# Altium schematic symbol library TitansLib.SchLib: 462 symbols (part 4 of 24)
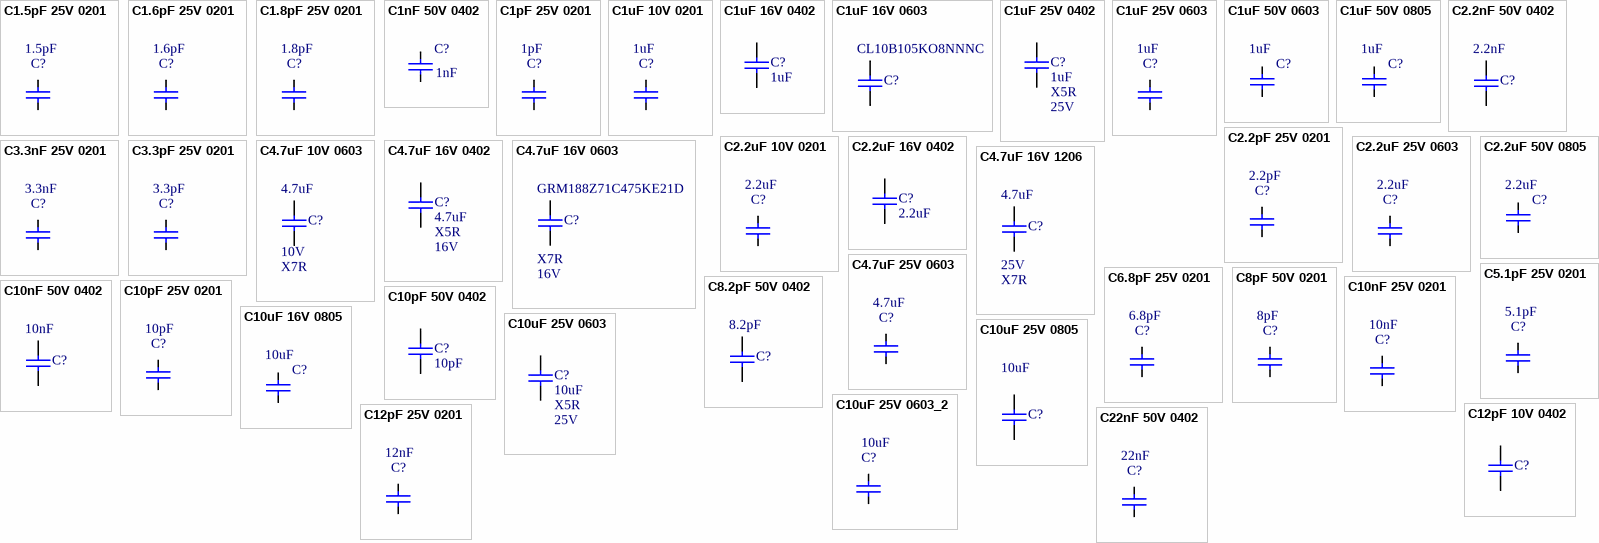
[diagram p20: symbols C1.5pF 25V 0201 to C22nF 50V 0402]

## C1.5pF 25V 0201
designator C?, comment value 1.5pF  (hidden comment: GJM0335C1E1R5BB01D)
25V 1.5pF C0G 0201 Multilayer Ceramic Capacitors MLCC - SMD/SMT ROHS; Manufacturer: Murata; Manufacturer Lifecycle Status: IN PRODUCTION; Temperature Coefficient: 30ppm/°C; Supplier: DigiKey; Supplier Part Number: 490-11175-1-ND; Manufacturer Part Number: GJM0335C1E1R5BB01D; RoHS: Compliant; Category: Ceramic Capacitors; Stock: 1362018; Pricing: 1=0.1, 10=0.052, 50=0.0356, 100=0.0307, 500=0.02244, 1000=0.01991, 2500=0.0143, 5000=0.01305 (USD); Case/Package: 0201; Case Code (Imperial): 0201; Case Code (Metric): 0603; Depth: 300µm; Dielectric: C0G; Dielectric Material: Ceramic; Export Control Classification Number (ECCN) Code: EAR99; Height: 300µm; Harmonized Tariff Schedule (HTS) Code: 8532.24.00.20; Introduction Date: 2008-02-22; Lead Free: Lead Free; Length: 600µm; Lifecycle Status: Production; Material: Ceramic; Max Operating Temperature: 125°C; Min Operating Temperature: -55°C; Mounting Technology: Surface Mount; Number of Terminals: 2; Packaging: Tape & Reel; Radiation Hardening: No; REACH SVHC: Yes; Schedule B: 8532240020, 8532240020|8532240020|8532240020|8532240020|8532240020; Termination: SMD/SMT; Thickness: 300µm; Voltage Rating: 25V; Voltage Rating (DC): 25V; Width: 300µm; ComponentLink1URL: https://datasheet.octopart.com:443/GJM0335C1E1R5BB01D-Murata-datasheet-14405739.pdf?src-supplier=Future+Electronics; ComponentLink1Description: https://datasheet.octopart.com:443/GJM0335C1E1R5BB01D-Murata-datasheet-14405739.pdf?src-supplier=Future+Electronics; ComponentLink2URL: https://datasheet.octopart.com:443/GJM0335C1E1R5BB01D-Murata-datasheet-22122223.pdf?src-supplier=Future+Electronics; ComponentLink2Description: https://datasheet.octopart.com:443/GJM0335C1E1R5BB01D-Murata-datasheet-22122223.pdf?src-supplier=Future+Electronics; ComponentLink3URL: https://datasheet.octopart.com:443/GJM0335C1E1R5BB01D-Murata-datasheet-44104868.pdf?src-supplier=Future+Electronics; ComponentLink3Description: https://datasheet.octopart.com:443/GJM0335C1E1R5BB01D-Murata-datasheet-44104868.pdf?src-supplier=Future+Electronics; ComponentLink4URL: https://datasheet.octopart.com:443/GJM0335C1E1R5BB01D-Murata-datasheet-165579666.pdf?src-supplier=TME; ComponentLink4Description: https://datasheet.octopart.com:443/GJM0335C1E1R5BB01D-Murata-datasheet-165579666.pdf?src-supplier=TME; ComponentLink5URL: https://datasheet.octopart.com:443/GJM0335C1E1R5BB01D-Murata-datasheet-12511495.pdf?src-supplier=TME; ComponentLink5Description: https://datasheet.octopart.com:443/GJM0335C1E1R5BB01D-Murata-datasheet-12511495.pdf?src-supplier=TME; ComponentLink6URL: https://datasheet.octopart.com:443/GJM0335C1E1R5BB01D-Murata-datasheet-141270577.pdf?src-supplier=Ciiva; ComponentLink6Description: https://datasheet.octopart.com:443/GJM0335C1E1R5BB01D-Murata-datasheet-141270577.pdf?src-supplier=Ciiva; ComponentLink7URL: https://datasheet.octopart.com:443/GJM0335C1E1R5BB01D-Murata-datasheet-140663708.pdf?src-supplier=Ciiva; ComponentLink7Description: https://datasheet.octopart.com:443/GJM0335C1E1R5BB01D-Murata-datasheet-140663708.pdf?src-supplier=Ciiva; ComponentLink8URL: https://datasheet.octopart.com:443/GJM0335C1E1R5BB01D-Murata-datasheet-138722006.pdf?src-supplier=Ciiva; ComponentLink8Description: https://datasheet.octopart.com:443/GJM0335C1E1R5BB01D-Murata-datasheet-138722006.pdf?src-supplier=Ciiva; ComponentLink9URL: https://datasheet.octopart.com/GJM0335C1E1R5BB01D-Murata-datasheet-12515295.pdf; ComponentLink9Description: https://datasheet.octopart.com/GJM0335C1E1R5BB01D-Murata-datasheet-12515295.pdf; ComponentLink10URL: https://datasheet.octopart.com/GJM0335C1E1R5BB01D-Murata-datasheet-12510076.pdf; ComponentLink10Description: https://datasheet.octopart.com/GJM0335C1E1R5BB01D-Murata-datasheet-12510076.pdf; ComponentLink11URL: https://datasheet.octopart.com/GJM0335C1E1R5BB01D-Murata-datasheet-11978611.pdf; ComponentLink11Description: https://datasheet.octopart.com/GJM0335C1E1R5BB01D-Murata-datasheet-11978611.pdf; ComponentLink12URL: https://datasheet.octopart.com/GJM0335C1E1R5BB01D-Murata-datasheet-10025737.pdf; ComponentLink12Description: https://datasheet.octopart.com/GJM0335C1E1R5BB01D-Murata-datasheet-10025737.pdf; ComponentLink13URL: https://datasheet.octopart.com/GJM0335C1E1R5BB01D-Murata-datasheet-8819587.pdf; ComponentLink13Description: https://datasheet.octopart.com/GJM0335C1E1R5BB01D-Murata-datasheet-8819587.pdf; ComponentLink14URL: http://sigma.octopart.com:80/reach_statement/Murata-company-16.pdf?src-supplier=Compliance+Statements; ComponentLink14Description: http://sigma.octopart.com:80/reach_statement/Murata-company-16.pdf?src-supplier=Compliance+Statements
footprint CAPC0603X03N (Chip Capacitor, 2-Leads, Body 0.60x0.30mm, IPC Medium Density)
pins: 1, 2

## C1.6pF 25V 0201
designator C?, comment value 1.6pF  (hidden comment: GJM0335C1E1R3BB01D)
25V 1.6pF C0G 0201 Multilayer Ceramic Capacitors MLCC - SMD/SMT ROHS; Manufacturer: Murata; Manufacturer Part Number: GJM0335C1E1R6BB01D; Manufacturer Lifecycle Status: IN PRODUCTION; Temperature Coefficient: 30ppm/°C; Supplier: DigiKey; Supplier Part Number: 490-11177-1-ND; RoHS: Compliant; Category: Ceramic Capacitors; Stock: 99257; Pricing: 1=0.1, 10=0.037, 50=0.025, 100=0.0214, 500=0.01538, 1000=0.01353, 2500=0.01159, 5000=0.01042 (USD); Case/Package: 0201; Case Code (Imperial): 0201; Case Code (Metric): 0603; Depth: 300µm; Dielectric: C0G; Dielectric Material: Ceramic; Height: 300µm; Lead Free: Lead Free; Length: 600µm; Lifecycle Status: Production; Material: Ceramic; Max Operating Temperature: 125°C; Min Operating Temperature: -55°C; Mounting Technology: Surface Mount; Number of Terminals: 2; Packaging: Tape & Reel; Radiation Hardening: No; REACH SVHC: Yes; Schedule B: 8532240020, 8532240020|8532240020|8532240020|8532240020|8532240020; Termination: SMD/SMT; Thickness: 300µm; Voltage Rating: 25V; Voltage Rating (DC): 25V; Width: 300µm; ComponentLink1URL: https://datasheet.octopart.com:443/GJM0335C1E1R6BB01D-Murata-datasheet-165579666.pdf?src-supplier=TME; ComponentLink1Description: https://datasheet.octopart.com:443/GJM0335C1E1R6BB01D-Murata-datasheet-165579666.pdf?src-supplier=TME; ComponentLink2URL: https://datasheet.octopart.com:443/GJM0335C1E1R6BB01D-Murata-datasheet-12511495.pdf?src-supplier=TME; ComponentLink2Description: https://datasheet.octopart.com:443/GJM0335C1E1R6BB01D-Murata-datasheet-12511495.pdf?src-supplier=TME; ComponentLink3URL: https://datasheet.octopart.com:443/GJM0335C1E1R6BB01D-Murata-datasheet-141270577.pdf?src-supplier=Ciiva; ComponentLink3Description: https://datasheet.octopart.com:443/GJM0335C1E1R6BB01D-Murata-datasheet-141270577.pdf?src-supplier=Ciiva; ComponentLink4URL: https://datasheet.octopart.com:443/GJM0335C1E1R6BB01D-Murata-datasheet-140663711.pdf?src-supplier=Ciiva; ComponentLink4Description: https://datasheet.octopart.com:443/GJM0335C1E1R6BB01D-Murata-datasheet-140663711.pdf?src-supplier=Ciiva; ComponentLink5URL: https://datasheet.octopart.com:443/GJM0335C1E1R6BB01D-Murata-datasheet-138722009.pdf?src-supplier=Ciiva; ComponentLink5Description: https://datasheet.octopart.com:443/GJM0335C1E1R6BB01D-Murata-datasheet-138722009.pdf?src-supplier=Ciiva; ComponentLink6URL: https://datasheet.octopart.com:443/GJM0335C1E1R6BB01D-Murata-datasheet-22122223.pdf?src-supplier=Future+Electronics; ComponentLink6Description: https://datasheet.octopart.com:443/GJM0335C1E1R6BB01D-Murata-datasheet-22122223.pdf?src-supplier=Future+Electronics; ComponentLink7URL: https://datasheet.octopart.com/GJM0335C1E1R6BB01D-Murata-datasheet-12515295.pdf; ComponentLink7Description: https://datasheet.octopart.com/GJM0335C1E1R6BB01D-Murata-datasheet-12515295.pdf; ComponentLink8URL: https://datasheet.octopart.com/GJM0335C1E1R6BB01D-Murata-datasheet-12510076.pdf; ComponentLink8Description: https://datasheet.octopart.com/GJM0335C1E1R6BB01D-Murata-datasheet-12510076.pdf; ComponentLink9URL: https://datasheet.octopart.com/GJM0335C1E1R6BB01D-Murata-datasheet-11978611.pdf; ComponentLink9Description: https://datasheet.octopart.com/GJM0335C1E1R6BB01D-Murata-datasheet-11978611.pdf; ComponentLink10URL: https://datasheet.octopart.com/GJM0335C1E1R6BB01D-Murata-datasheet-10025737.pdf; ComponentLink10Description: https://datasheet.octopart.com/GJM0335C1E1R6BB01D-Murata-datasheet-10025737.pdf; ComponentLink11URL: https://datasheet.octopart.com/GJM0335C1E1R6BB01D-Murata-datasheet-8819587.pdf; ComponentLink11Description: https://datasheet.octopart.com/GJM0335C1E1R6BB01D-Murata-datasheet-8819587.pdf; ComponentLink12URL: https://datasheet.octopart.com/GJM0335C1E1R6BB01D-Murata-datasheet-14405748.pdf; ComponentLink12Description: https://datasheet.octopart.com/GJM0335C1E1R6BB01D-Murata-datasheet-14405748.pdf; ComponentLink13URL: http://sigma.octopart.com:80/reach_statement/Murata-company-16.pdf?src-supplier=Compliance+Statements; ComponentLink13Description: http://sigma.octopart.com:80/reach_statement/Murata-company-16.pdf?src-supplier=Compliance+Statements
footprint CAPC0603X03N (Chip Capacitor, 2-Leads, Body 0.60x0.30mm, IPC Medium Density)
pins: 1, 2

## C1.8pF 25V 0201
designator C?, comment value 1.8pF  (hidden comment: GJM0335C1E1R8BB01D)
25V 1.8pF C0G 0201 Multilayer Ceramic Capacitors MLCC - SMD/SMT ROHS; Manufacturer: Murata; Manufacturer Lifecycle Status: IN PRODUCTION; Temperature Coefficient: 30ppm/°C; Supplier: DigiKey; Supplier Part Number: 490-8581-1-ND; Manufacturer Part Number: GJM0335C1E1R8BB01D; RoHS: Compliant; Category: Ceramic Capacitors; Stock: 504881; Pricing: 1=0.1, 10=0.052, 50=0.0356, 100=0.0307, 500=0.02244, 1000=0.01991, 2500=0.0143 (USD); Case/Package: 0201; Case Code (Imperial): 0201; Case Code (Metric): 0603; Depth: 300µm; Dielectric: C0G; Dielectric Material: Ceramic; Export Control Classification Number (ECCN) Code: EAR99; Height: 300µm; Harmonized Tariff Schedule (HTS) Code: 8532.24.00.20; Introduction Date: 2008-02-22; Lead Free: Lead Free; Length: 600µm; Lifecycle Status: Production; Material: Ceramic; Max Operating Temperature: 125°C; Min Operating Temperature: -55°C; Mounting Technology: Surface Mount; Number of Terminals: 2; Packaging: Bulk; Radiation Hardening: No; REACH SVHC: Yes; Schedule B: 8532240020, 8532240020|8532240020, 8532240020|8532240020|8532240020, 8532240020|8532240020|8532240020|8532240020; Termination: SMD/SMT; Thickness: 300µm; Voltage Rating: 25V; Voltage Rating (DC): 25V; Width: 300µm; ComponentLink1URL: https://datasheet.octopart.com:443/GJM0335C1E1R8BB01D-Murata-datasheet-165579666.pdf?src-supplier=TME; ComponentLink1Description: https://datasheet.octopart.com:443/GJM0335C1E1R8BB01D-Murata-datasheet-165579666.pdf?src-supplier=TME; ComponentLink2URL: https://datasheet.octopart.com:443/GJM0335C1E1R8BB01D-Murata-datasheet-12511495.pdf?src-supplier=TME; ComponentLink2Description: https://datasheet.octopart.com:443/GJM0335C1E1R8BB01D-Murata-datasheet-12511495.pdf?src-supplier=TME; ComponentLink3URL: https://datasheet.octopart.com:443/GJM0335C1E1R8BB01D-Murata-datasheet-141270577.pdf?src-supplier=Ciiva; ComponentLink3Description: https://datasheet.octopart.com:443/GJM0335C1E1R8BB01D-Murata-datasheet-141270577.pdf?src-supplier=Ciiva; ComponentLink4URL: https://datasheet.octopart.com:443/GJM0335C1E1R8BB01D-Murata-datasheet-140663717.pdf?src-supplier=Ciiva; ComponentLink4Description: https://datasheet.octopart.com:443/GJM0335C1E1R8BB01D-Murata-datasheet-140663717.pdf?src-supplier=Ciiva; ComponentLink5URL: https://datasheet.octopart.com:443/GJM0335C1E1R8BB01D-Murata-datasheet-138722015.pdf?src-supplier=Ciiva; ComponentLink5Description: https://datasheet.octopart.com:443/GJM0335C1E1R8BB01D-Murata-datasheet-138722015.pdf?src-supplier=Ciiva; ComponentLink6URL: https://datasheet.octopart.com:443/GJM0335C1E1R8BB01D-Murata-datasheet-192320398.pdf?src-supplier=HQonline; ComponentLink6Description: https://datasheet.octopart.com:443/GJM0335C1E1R8BB01D-Murata-datasheet-192320398.pdf?src-supplier=HQonline; ComponentLink7URL: https://datasheet.octopart.com/GJM0335C1E1R8BB01D-Murata-datasheet-12515295.pdf; ComponentLink7Description: https://datasheet.octopart.com/GJM0335C1E1R8BB01D-Murata-datasheet-12515295.pdf; ComponentLink8URL: https://datasheet.octopart.com/GJM0335C1E1R8BB01D-Murata-datasheet-12510076.pdf; ComponentLink8Description: https://datasheet.octopart.com/GJM0335C1E1R8BB01D-Murata-datasheet-12510076.pdf; ComponentLink9URL: https://datasheet.octopart.com/GJM0335C1E1R8BB01D-Murata-datasheet-11978611.pdf; ComponentLink9Description: https://datasheet.octopart.com/GJM0335C1E1R8BB01D-Murata-datasheet-11978611.pdf; ComponentLink10URL: https://datasheet.octopart.com/GJM0335C1E1R8BB01D-Murata-datasheet-10025737.pdf; ComponentLink10Description: https://datasheet.octopart.com/GJM0335C1E1R8BB01D-Murata-datasheet-10025737.pdf; ComponentLink11URL: https://datasheet.octopart.com/GJM0335C1E1R8BB01D-Murata-datasheet-8819587.pdf; ComponentLink11Description: https://datasheet.octopart.com/GJM0335C1E1R8BB01D-Murata-datasheet-8819587.pdf; ComponentLink12URL: https://datasheet.octopart.com/GJM0335C1E1R8BB01D-Murata-datasheet-14405746.pdf; ComponentLink12Description: https://datasheet.octopart.com/GJM0335C1E1R8BB01D-Murata-datasheet-14405746.pdf; ComponentLink13URL: https://datasheet.octopart.com:443/GJM0335C1E1R8BB01D-Murata-datasheet-118811.pdf?src-supplier=DigiKey; ComponentLink13Description: https://datasheet.octopart.com:443/GJM0335C1E1R8BB01D-Murata-datasheet-118811.pdf?src-supplier=DigiKey; ComponentLink14URL: https://datasheet.octopart.com:443/GJM0335C1E1R8BB01D-Murata-datasheet-62043883.pdf?src-supplier=Future+Electronics; ComponentLink14Description: https://datasheet.octopart.com:443/GJM0335C1E1R8BB01D-Murata-datasheet-62043883.pdf?src-supplier=Future+Electronics; ComponentLink15URL: http://sigma.octopart.com:80/reach_statement/Murata-company-16.pdf?src-supplier=Compliance+Statements; ComponentLink15Description: http://sigma.octopart.com:80/reach_statement/Murata-company-16.pdf?src-supplier=Compliance+Statements
footprint CAPC0603X03N (Chip Capacitor, 2-Leads, Body 0.60x0.30mm, IPC Medium Density)
pins: 1, 2

## C1nF 50V 0402
designator C?, comment value 1nF  (hidden comment: 04025C102KAZ2A)
Multilayer Ceramic Capacitors MLCC - SMD/SMT 1nF+/-10% 50V X7R 0402; Manufacturer: Samsung Electro-Mechanics; Supplier: Mouser; Supplier Part Number: 581-04025C102KAZ2A; Manufacturer Part Number: 04025C102KAZ2A; RoHS: Compliant; Category: Ceramic Capacitors; Stock: 26548; Supplier Unit Price 1: 0.12; Case/Package: 0402; Dielectric: X7R
footprint CAPC0402-M (Chip Capacitor, 2-Leads, Body 1.00x0.50mm, IPC Medium Density)
pins: 1, 2

## C1pF 25V 0201
designator C?, comment value 1pF  (hidden comment: GJM0335C1E1R0WB01D)
0201 1 pF 25 V ±0.05 pF Tolerance C0G SMT Multilayer Ceramic Capacitor; Manufacturer: Murata; Manufacturer Lifecycle Status: IN PRODUCTION; Temperature Coefficient: 30ppm/°C; Voltage Rating: 25V; Supplier: DigiKey; Supplier Part Number: 490-10677-1-ND; Manufacturer Part Number: GJM0335C1E1R0WB01D; RoHS: Compliant; Category: Ceramic Capacitors; Stock: 218006; Pricing: 1=0.1, 10=0.053, 50=0.0364, 100=0.0314, 500=0.02294, 1000=0.02037, 2500=0.01766, 5000=0.01602 (USD); Case/Package: 0201; Case Code (Imperial): 0201; Case Code (Metric): 0603; Depth: 300µm; Dielectric: C0G; Dielectric Material: Ceramic; Export Control Classification Number (ECCN) Code: EAR99; Height: 300µm; Harmonized Tariff Schedule (HTS) Code: 8532.24.00.20; Introduction Date: 2008-02-22; Lead Free: Lead Free; Length: 600µm; Lifecycle Status: Production; Material: Ceramic; Max Operating Temperature: 125°C; Min Operating Temperature: -55°C; Mounting Technology: Surface Mount; Number of Terminals: 2; Packaging: Tape & Reel; Radiation Hardening: No; REACH SVHC: Yes; Schedule B: 8532240020, 8532240020|8532240020, 8532240020|8532240020|8532240020, 8532240020|8532240020|8532240020|8532240020; Termination: SMD/SMT; Thickness: 300µm; Voltage Rating (DC): 25V; Width: 300µm; ComponentLink1URL: https://datasheet.octopart.com:443/GJM0335C1E1R0WB01D-Murata-datasheet-165579666.pdf?src-supplier=TME; ComponentLink1Description: https://datasheet.octopart.com:443/GJM0335C1E1R0WB01D-Murata-datasheet-165579666.pdf?src-supplier=TME; ComponentLink2URL: https://datasheet.octopart.com:443/GJM0335C1E1R0WB01D-Murata-datasheet-12511495.pdf?src-supplier=TME; ComponentLink2Description: https://datasheet.octopart.com:443/GJM0335C1E1R0WB01D-Murata-datasheet-12511495.pdf?src-supplier=TME; ComponentLink3URL: https://datasheet.octopart.com:443/GJM0335C1E1R0WB01D-Murata-datasheet-141270577.pdf?src-supplier=Ciiva; ComponentLink3Description: https://datasheet.octopart.com:443/GJM0335C1E1R0WB01D-Murata-datasheet-141270577.pdf?src-supplier=Ciiva; ComponentLink4URL: https://datasheet.octopart.com:443/GJM0335C1E1R0WB01D-Murata-datasheet-140663695.pdf?src-supplier=Ciiva; ComponentLink4Description: https://datasheet.octopart.com:443/GJM0335C1E1R0WB01D-Murata-datasheet-140663695.pdf?src-supplier=Ciiva; ComponentLink5URL: https://datasheet.octopart.com:443/GJM0335C1E1R0WB01D-Murata-datasheet-138721991.pdf?src-supplier=Ciiva; ComponentLink5Description: https://datasheet.octopart.com:443/GJM0335C1E1R0WB01D-Murata-datasheet-138721991.pdf?src-supplier=Ciiva; ComponentLink6URL: https://datasheet.octopart.com:443/GJM0335C1E1R0WB01D-Murata-datasheet-32479577.pdf?src-supplier=Future+Electronics; ComponentLink6Description: https://datasheet.octopart.com:443/GJM0335C1E1R0WB01D-Murata-datasheet-32479577.pdf?src-supplier=Future+Electronics; ComponentLink7URL: https://datasheet.octopart.com:443/GJM0335C1E1R0WB01D-Murata-datasheet-22122223.pdf?src-supplier=Future+Electronics; ComponentLink7Description: https://datasheet.octopart.com:443/GJM0335C1E1R0WB01D-Murata-datasheet-22122223.pdf?src-supplier=Future+Electronics; ComponentLink8URL: https://datasheet.octopart.com/GJM0335C1E1R0WB01D-Murata-datasheet-12515295.pdf; ComponentLink8Description: https://datasheet.octopart.com/GJM0335C1E1R0WB01D-Murata-datasheet-12515295.pdf; ComponentLink9URL: https://datasheet.octopart.com/GJM0335C1E1R0WB01D-Murata-datasheet-12510076.pdf; ComponentLink9Description: https://datasheet.octopart.com/GJM0335C1E1R0WB01D-Murata-datasheet-12510076.pdf; ComponentLink10URL: https://datasheet.octopart.com/GJM0335C1E1R0WB01D-Murata-datasheet-11978611.pdf; ComponentLink10Description: https://datasheet.octopart.com/GJM0335C1E1R0WB01D-Murata-datasheet-11978611.pdf; ComponentLink11URL: https://datasheet.octopart.com/GJM0335C1E1R0WB01D-Murata-datasheet-10025737.pdf; ComponentLink11Description: https://datasheet.octopart.com/GJM0335C1E1R0WB01D-Murata-datasheet-10025737.pdf; ComponentLink12URL: https://datasheet.octopart.com/GJM0335C1E1R0WB01D-Murata-datasheet-8819587.pdf; ComponentLink12Description: https://datasheet.octopart.com/GJM0335C1E1R0WB01D-Murata-datasheet-8819587.pdf; ComponentLink13URL: https://datasheet.octopart.com/GJM0335C1E1R0WB01D-Murata-datasheet-14405727.pdf; ComponentLink13Description: https://datasheet.octopart.com/GJM0335C1E1R0WB01D-Murata-datasheet-14405727.pdf; ComponentLink14URL: http://sigma.octopart.com:80/reach_statement/Murata-company-16.pdf?src-supplier=Compliance+Statements; ComponentLink14Description: http://sigma.octopart.com:80/reach_statement/Murata-company-16.pdf?src-supplier=Compliance+Statements
footprint CAPC0603X03N (Chip Capacitor, 2-Leads, Body 0.60x0.30mm, IPC Medium Density)
pins: 1, 2

## C1uF 10V 0201
designator C?, comment value 1uF  (hidden comment: GRM033R61A105ME44D)
10V 1uF X5R ±20% 0201 Multilayer Ceramic Capacitors MLCC - SMD/SMT ROHS; Manufacturer: Murata; Manufacturer Lifecycle Status: IN PRODUCTION; Supplier: DigiKey; Supplier Part Number: 490-GRM033R61A105ME44DCT-ND; Manufacturer Part Number: GRM033R61A105ME44D; RoHS: Compliant; Category: Ceramic Capacitors; Stock: 98810; Pricing: 1=0.1, 10=0.024, 50=0.0158, 100=0.0135, 500=0.00966, 1000=0.0084, 2500=0.00695, 5000=0.00637 (USD); Case/Package: 0201; Country of Origin: Philippines; Dielectric: X5R; Dielectric Material: Ceramic; Export Control Classification Number (ECCN) Code: EAR99; Height: 300µm; Harmonized Tariff Schedule (HTS) Code: 8532.24.00.20; Introduction Date: 2018-10-26; Length: 600µm; Lifecycle Status: Production; Material: Ceramic; Max Operating Temperature: 85°C; Min Operating Temperature: -55°C; Mounting Technology: Surface Mount; Number of Terminals: 2; REACH SVHC: Yes; Thickness: 300µm; Tolerance: 20%; Voltage Rating: 10V; Voltage Rating (DC): 10V; Width: 300µm; ComponentLink1URL: https://datasheet.octopart.com:443/GRM033R61A105ME44D-Murata-datasheet-165579666.pdf?src-supplier=TME; ComponentLink1Description: https://datasheet.octopart.com:443/GRM033R61A105ME44D-Murata-datasheet-165579666.pdf?src-supplier=TME; ComponentLink2URL: https://datasheet.octopart.com:443/GRM033R61A105ME44D-Murata-datasheet-141274201.pdf?src-supplier=Ciiva; ComponentLink2Description: https://datasheet.octopart.com:443/GRM033R61A105ME44D-Murata-datasheet-141274201.pdf?src-supplier=Ciiva; ComponentLink3URL: https://datasheet.octopart.com:443/GRM033R61A105ME44D-Murata-datasheet-140676071.pdf?src-supplier=Ciiva; ComponentLink3Description: https://datasheet.octopart.com:443/GRM033R61A105ME44D-Murata-datasheet-140676071.pdf?src-supplier=Ciiva; ComponentLink4URL: https://datasheet.octopart.com:443/GRM033R61A105ME44D-Murata-datasheet-138738382.pdf?src-supplier=Ciiva; ComponentLink4Description: https://datasheet.octopart.com:443/GRM033R61A105ME44D-Murata-datasheet-138738382.pdf?src-supplier=Ciiva; ComponentLink5URL: https://datasheet.octopart.com:443/GRM033R61A105ME44D-Murata-datasheet-149975212.pdf?src-supplier=Future+Electronics; ComponentLink5Description: https://datasheet.octopart.com:443/GRM033R61A105ME44D-Murata-datasheet-149975212.pdf?src-supplier=Future+Electronics; ComponentLink6URL: https://datasheet.octopart.com:443/GRM033R61A105ME44D-Murata-datasheet-32479577.pdf?src-supplier=Future+Electronics; ComponentLink6Description: https://datasheet.octopart.com:443/GRM033R61A105ME44D-Murata-datasheet-32479577.pdf?src-supplier=Future+Electronics; ComponentLink7URL: https://datasheet.octopart.com/GRM033R61A105ME44D-Murata-datasheet-12515295.pdf; ComponentLink7Description: https://datasheet.octopart.com/GRM033R61A105ME44D-Murata-datasheet-12515295.pdf; ComponentLink8URL: https://datasheet.octopart.com/GRM033R61A105ME44D-Murata-datasheet-12510076.pdf; ComponentLink8Description: https://datasheet.octopart.com/GRM033R61A105ME44D-Murata-datasheet-12510076.pdf; ComponentLink9URL: https://datasheet.octopart.com/GRM033R61A105ME44D-Murata-datasheet-11978611.pdf; ComponentLink9Description: https://datasheet.octopart.com/GRM033R61A105ME44D-Murata-datasheet-11978611.pdf; ComponentLink10URL: https://datasheet.octopart.com/GRM033R61A105ME44D-Murata-datasheet-10025737.pdf; ComponentLink10Description: https://datasheet.octopart.com/GRM033R61A105ME44D-Murata-datasheet-10025737.pdf; ComponentLink11URL: https://datasheet.octopart.com/GRM033R61A105ME44D-Murata-datasheet-8819587.pdf; ComponentLink11Description: https://datasheet.octopart.com/GRM033R61A105ME44D-Murata-datasheet-8819587.pdf; ComponentLink12URL: http://sigma.octopart.com:80/reach_statement/Murata-company-16.pdf?src-supplier=Compliance+Statements; ComponentLink12Description: http://sigma.octopart.com:80/reach_statement/Murata-company-16.pdf?src-supplier=Compliance+Statements
footprint CAPC0603X03N (Chip Capacitor, 2-Leads, Body 0.60x0.30mm, IPC Medium Density)
pins: 1, 2

## C1uF 16V 0402
designator C?, comment value 1uF  (hidden comment: CC0402KRX5R7BB105)
1uF 16V X5R 10% 0402; Manufacturer: Yageo; Type: Capacitor; Package: 0402; Manufacturer Part Number: CC0402KRX5R7BB105; Supplier 1: Digikey; Supplier Part Number 1: 311-1691-1-ND; Supplier Link 1: https://www.digikey.fr/product-detail/en/yageo/CC0402KRX5R7BB105/311-1691-1-ND/5195593; Datasheet: https://www.yageo.com/upload/media/product/productsearch/datasheet/mlcc/UPY-GPHC_X5R_4V-to-50V_26.pdf; Tolerance: 10%; Voltage: 16V; Temp Coef: X5R
footprint C0402_H0P7
pins: 1, 2

## C1uF 16V 0603
designator C?, comment CL10B105KO8NNNC
1uF 16V X7R 10%; Manufacturer: Samsung; Dielectric Material: Ceramic; Multilayer: Yes; Supplier: Avnet; Supplier Part Number: CL10B105KO8NNNC; Manufacturer Part Number: CL10B105KO8NNNC; RoHS: Yes; Category: Ceramic Capacitors; Stock: 3952000; Pricing: 4000=0.00408, 8000=0.00401, 16000=0.00394, 24000=0.00388, 32000=0.00381 (USD); Mounting Technology: Surface Mount; Pins: 2; Package Shape: Rectangular; Case/Package: 0603; Terminal Finish: Nickel; Min Operating Temperature: -55°C; Max Operating Temperature: 125°C; JESD-609 Code: e3; Termination: Wraparound; Value: 1uF; Capacitor Type: Ceramic; Tolerance  (fill in as +-): 10%; Packaging: Tape and Reel; Tolerance (fill in as +-): 10%; Rated DC Voltage (URdc): 16V; Temperature Characteristics Code: X7R; Reach SVHC Compliant: Yes; RoHS Compliant: Yes; ComponentLink1URL: https://datasheet.ciiva.com:443/pdfs/VipMasterIC/IC/SEMS/SEMS-S-A0008529196/SEMS-S-A0008529196-1.pdf?src-supplier=IHS+Markit; ComponentLink1Description: https://datasheet.ciiva.com:443/pdfs/VipMasterIC/IC/SEMS/SEMS-S-A0008529196/SEMS-S-A0008529196-1.pdf?src-supplier=IHS+Markit; ComponentLink2URL: https://datasheet.ciiva.com/15195/getdatasheetpartid-357418-15195728.pdf?src-supplier=Verical; ComponentLink2Description: https://datasheet.ciiva.com/15195/getdatasheetpartid-357418-15195728.pdf?src-supplier=Verical; ComponentLink3URL: https://datasheet.ciiva.com/29198/458176-da-01-en-vs-kondensator-0603-29198478.pdf?src-supplier=Conrad; ComponentLink3Description: https://datasheet.ciiva.com/29198/458176-da-01-en-vs-kondensator-0603-29198478.pdf?src-supplier=Conrad
footprint C0603_H0P8
pins: 1, 2

## C1uF 25V 0402
designator C?, comment Temp Coef: X5R  Voltage: 25V  (hidden comment: 1uF)
1uF 25V X5R 10% 0402; Manufacturer: Murata Electronics; Manufacturer Part Number: GRM155R61E105KA12D; Type: Capacitor; Package: 0402; Supplier 1: Digikey; Supplier Part Number 1: 490-10017-1-ND; Supplier Link 1: https://www.digikey.com/product-detail/en/murata-electronics/GRM155R61E105KA12D/490-10017-1-ND/5026367; Tolerance: 10%; Value: 1uF
footprint C0402_H0P7
pins: 1, 2

## C1uF 25V 0603
designator C?, comment value 1uF  (hidden comment: CC0603KRX5R8BB105)
Multilayer Ceramic Capacitors MLCC – SMD/SMT; YAGEO; CC0603KRX5R8BB105; 1 µF; 0603; 25 V; 25 V; Manufacturer: Yageo Group; Dielectric: X5R; Tolerance: 10%; Voltage Rating: 25V; Supplier: DigiKey; Supplier Part Number: 311-1445-1-ND; Manufacturer Part Number: CC0603KRX5R8BB105; RoHS: Compliant; Category: Ceramic Capacitors; Stock: 1096735; Pricing: 1=0.1, 10=0.057, 50=0.0392, 100=0.0339, 500=0.02488, 1000=0.02212 (USD); Case/Package: 0603; Case Code (Imperial): 0603; Case Code (Metric): 1608; China RoHS: Compliant; Country of Origin: Mainland China, Taiwan; Depth: 800µm; Dielectric Material: Ceramic; Export Control Classification Number (ECCN) Code: EAR99; Halogen Free: Halogen Free; Height: 800µm; Harmonized Tariff Schedule (HTS) Code: 8532.24.00.20; Introduction Date: 2009-04-16; Lead Free: Lead Free; Length: 1.6mm; Lifecycle Status: Production; Material: Ceramic; Max Operating Temperature: 85°C; Min Operating Temperature: -55°C; Mounting Technology: Surface Mount; Pins: 2; Number of Terminals: 2; Radiation Hardening: No; REACH SVHC: Yes; Schedule B: 8532240020, 8532240020|8532240020, 8532240020|8532240020|8532240020, 8532240020|8532240020|8532240020|8532240020; Termination: SMD/SMT; Thickness: 889µm; Voltage Rating (DC): 25V; Width: 800µm; ComponentLink1URL: https://datasheet.octopart.com:443/CC0603KRX5R8BB105-Yageo-datasheet-170350636.pdf?src-supplier=IHS; ComponentLink1Description: https://datasheet.octopart.com:443/CC0603KRX5R8BB105-Yageo-datasheet-170350636.pdf?src-supplier=IHS; ComponentLink2URL: https://datasheet.octopart.com:443/CC0603KRX5R8BB105-Yageo-datasheet-82288757.pdf?src-supplier=Upverter; ComponentLink2Description: https://datasheet.octopart.com:443/CC0603KRX5R8BB105-Yageo-datasheet-82288757.pdf?src-supplier=Upverter; ComponentLink3URL: https://datasheet.octopart.com:443/CC0603KRX5R8BB105-Yageo-datasheet-10911834.pdf?src-supplier=element14+APAC; ComponentLink3Description: https://datasheet.octopart.com:443/CC0603KRX5R8BB105-Yageo-datasheet-10911834.pdf?src-supplier=element14+APAC; ComponentLink4URL: https://datasheet.octopart.com:443/CC0603KRX5R8BB105-Yageo-datasheet-8324442.pdf?src-supplier=element14+APAC; ComponentLink4Description: https://datasheet.octopart.com:443/CC0603KRX5R8BB105-Yageo-datasheet-8324442.pdf?src-supplier=element14+APAC; ComponentLink5URL: https://datasheet.octopart.com:443/CC0603KRX5R8BB105-Yageo-datasheet-62067349.pdf?src-supplier=element14+APAC; ComponentLink5Description: https://datasheet.octopart.com:443/CC0603KRX5R8BB105-Yageo-datasheet-62067349.pdf?src-supplier=element14+APAC; ComponentLink6URL: https://datasheet.octopart.com:443/CC0603KRX5R8BB105-Yageo-datasheet-140260304.pdf?src-supplier=Farnell; ComponentLink6Description: https://datasheet.octopart.com:443/CC0603KRX5R8BB105-Yageo-datasheet-140260304.pdf?src-supplier=Farnell; ComponentLink7URL: https://datasheet.octopart.com:443/CC0603KRX5R8BB105-Yageo-datasheet-181968541.pdf?src-supplier=Farnell; ComponentLink7Description: https://datasheet.octopart.com:443/CC0603KRX5R8BB105-Yageo-datasheet-181968541.pdf?src-supplier=Farnell; ComponentLink8URL: https://datasheet.octopart.com:443/CC0603KRX5R8BB105-Yageo-datasheet-181968534.pdf?src-supplier=Farnell; ComponentLink8Description: https://datasheet.octopart.com:443/CC0603KRX5R8BB105-Yageo-datasheet-181968534.pdf?src-supplier=Farnell; ComponentLink9URL: https://datasheet.octopart.com/CC0603KRX5R8BB105-Yageo-datasheet-86397281.pdf; ComponentLink9Description: https://datasheet.octopart.com/CC0603KRX5R8BB105-Yageo-datasheet-86397281.pdf; ComponentLink10URL: https://datasheet.octopart.com:443/CC0603KRX5R8BB105-Yageo-datasheet-158238148.pdf?src-supplier=Newark; ComponentLink10Description: https://datasheet.octopart.com:443/CC0603KRX5R8BB105-Yageo-datasheet-158238148.pdf?src-supplier=Newark; ComponentLink11URL: https://datasheet.octopart.com:443/CC0603KRX5R8BB105-Yageo-datasheet-149070021.pdf?src-supplier=TME; ComponentLink11Description: https://datasheet.octopart.com:443/CC0603KRX5R8BB105-Yageo-datasheet-149070021.pdf?src-supplier=TME; ComponentLink12URL: https://datasheet.octopart.com:443/CC0603KRX5R8BB105-Yageo-Group-datasheet-145016144.pdf?src-supplier=ODG+(Origin+Data+Global); ComponentLink12Description: https://datasheet.octopart.com:443/CC0603KRX5R8BB105-Yageo-Group-datasheet-145016144.pdf?src-supplier=ODG+(Origin+Data+Global); ComponentLink13URL: https://datasheet.octopart.com:443/CC0603KRX5R8BB105-Yageo-datasheet-137875056.pdf?src-supplier=Future+Electronics; ComponentLink13Description: https://datasheet.octopart.com:443/CC0603KRX5R8BB105-Yageo-datasheet-137875056.pdf?src-supplier=Future+Electronics; ComponentLink14URL: https://datasheet.octopart.com:443/CC0603KRX5R8BB105-Yageo-datasheet-137700082.pdf?src-supplier=Future+Electronics; ComponentLink14Description: https://datasheet.octopart.com:443/CC0603KRX5R8BB105-Yageo-datasheet-137700082.pdf?src-supplier=Future+Electronics; ComponentLink15URL: https://datasheet.octopart.com:443/CC0603KRX5R8BB105-Yageo-datasheet-137700085.pdf?src-supplier=Future+Electronics; ComponentLink15Description: https://datasheet.octopart.com:443/CC0603KRX5R8BB105-Yageo-datasheet-137700085.pdf?src-supplier=Future+Electronics; ComponentLink16URL: https://datasheet.octopart.com:443/CC0603KRX5R8BB105-Yageo-datasheet-59875459.pdf?src-supplier=Future+Electronics; ComponentLink16Description: https://datasheet.octopart.com:443/CC0603KRX5R8BB105-Yageo-datasheet-59875459.pdf?src-supplier=Future+Electronics; ComponentLink17URL: https://datasheet.octopart.com:443/CC0603KRX5R8BB105-Yageo-datasheet-14389981.pdf?src-supplier=Future+Electronics; ComponentLink17Description: https://datasheet.octopart.com:443/CC0603KRX5R8BB105-Yageo-datasheet-14389981.pdf?src-supplier=Future+Electronics; ComponentLink18URL: https://datasheet.octopart.com:443/CC0603KRX5R8BB105-Yageo-datasheet-8701639.pdf?src-supplier=element14; ComponentLink18Description: https://datasheet.octopart.com:443/CC0603KRX5R8BB105-Yageo-datasheet-8701639.pdf?src-supplier=element14; ComponentLink19URL: https://datasheet.octopart.com:443/CC0603KRX5R8BB105-Yageo-datasheet-519481.pdf?src-supplier=element14; ComponentLink19Description: https://datasheet.octopart.com:443/CC0603KRX5R8BB105-Yageo-datasheet-519481.pdf?src-supplier=element14; ComponentLink20URL: https://datasheet.octopart.com:443/CC0603KRX5R8BB105-Yageo-datasheet-68071816.pdf?src-supplier=Megastar; ComponentLink20Description: https://datasheet.octopart.com:443/CC0603KRX5R8BB105-Yageo-datasheet-68071816.pdf?src-supplier=Megastar; ComponentLink21URL: http://sigma.octopart.com:80/conflict_mineral_statement/Yageo-company-3.pdf?src-supplier=Compliance+Statements; ComponentLink21Description: http://sigma.octopart.com:80/conflict_mineral_statement/Yageo-company-3.pdf?src-supplier=Compliance+Statements; ComponentLink22URL: http://sigma.octopart.com:80/rohs_statement/Yageo-company-2.pdf?src-supplier=Compliance+Statements; ComponentLink22Description: http://sigma.octopart.com:80/rohs_statement/Yageo-company-2.pdf?src-supplier=Compliance+Statements; Supplier 1: DigiKey; Supplier Part Number 1: 311-1445-1-ND; Supplier 2: DigiKey; Supplier Part Number 2: 311-1445-2-ND; Supplier 3: Mouser; Supplier Part Number 3: 603-CC603KRX5R8BB105
footprint CAPC1608X10N (Chip Capacitor, 2-Leads, Body 1.60x0.80mm, IPC Medium Density)
pins: 1, 2

## C1uF 50V 0603
designator C?, comment value 1uF  (hidden comment: CL10B105KA8NNNC)
25V 1uF X7R ±10% 0603 Multilayer Ceramic Capacitors MLCC - SMD/SMT ROHS; Manufacturer: Samsung Electro-Mechanics; Supplier: DigiKey; Supplier Part Number: 1276-1184-1-ND; Manufacturer Part Number: CL10B105KA8NNNC; RoHS: Compliant; Category: Ceramic Capacitors; Stock: 1147716; Pricing: 1=0.08, 10=0.007 (USD); Case/Package: 0603; Case Code (Imperial): 0603; Case Code (Metric): 1608; China RoHS: Compliant; Contact Plating: Tin; Depth: 800µm; Dielectric: X7R; Dielectric Material: Ceramic; Height: 900µm; Length: 1.6mm; Lifecycle Status: Production; Material: Ceramic; Max Operating Temperature: 125°C; Min Operating Temperature: -55°C; Mounting Technology: Surface Mount; Number of Terminals: 2; Radiation Hardening: No; REACH SVHC: Yes; Schedule B: 8532240020, 8532240020|8532240020, 8532240020|8532240020|8532240020, 8532240020|8532240020|8532240020|8532240020; Thickness: 889µm; Tolerance: 10%; Voltage: 25V; Voltage Rating: 25V; Voltage Rating (DC): 25V; Width: 800µm; ComponentLink1URL: https://datasheet.octopart.com:443/CL10B105KA8NNNC-Samsung-Electro-Mechanics-datasheet-182019882.pdf?src-supplier=IHS; ComponentLink1Description: https://datasheet.octopart.com:443/CL10B105KA8NNNC-Samsung-Electro-Mechanics-datasheet-182019882.pdf?src-supplier=IHS; ComponentLink2URL: https://datasheet.octopart.com:443/CL10B105KA8NNNC-Samsung-Electro-Mechanics-datasheet-106547815.pdf?src-supplier=Upverter; ComponentLink2Description: https://datasheet.octopart.com:443/CL10B105KA8NNNC-Samsung-Electro-Mechanics-datasheet-106547815.pdf?src-supplier=Upverter; ComponentLink3URL: https://datasheet.octopart.com:443/CL10B105KA8NNNC-Samsung-Electro-Mechanics-datasheet-137699931.pdf?src-supplier=Samsung+SCT; ComponentLink3Description: https://datasheet.octopart.com:443/CL10B105KA8NNNC-Samsung-Electro-Mechanics-datasheet-137699931.pdf?src-supplier=Samsung+SCT; ComponentLink4URL: https://datasheet.octopart.com:443/CL10B105KA8NNNC-Samsung-Electro-Mechanics-datasheet-116890983.pdf?src-supplier=Future+Electronics; ComponentLink4Description: https://datasheet.octopart.com:443/CL10B105KA8NNNC-Samsung-Electro-Mechanics-datasheet-116890983.pdf?src-supplier=Future+Electronics; ComponentLink5URL: https://datasheet.octopart.com:443/CL10B105KA8NNNC-Samsung-datasheet-12527851.pdf?src-supplier=Future+Electronics; ComponentLink5Description: https://datasheet.octopart.com:443/CL10B105KA8NNNC-Samsung-datasheet-12527851.pdf?src-supplier=Future+Electronics; ComponentLink6URL: https://datasheet.octopart.com:443/CL10B105KA8NNNC-Samsung-datasheet-26669022.pdf?src-supplier=Future+Electronics; ComponentLink6Description: https://datasheet.octopart.com:443/CL10B105KA8NNNC-Samsung-datasheet-26669022.pdf?src-supplier=Future+Electronics; ComponentLink7URL: https://datasheet.octopart.com:443/CL10B105KA8NNNC-Samsung-Electro-Mechanics-datasheet-149136795.pdf?src-supplier=Future+Electronics; ComponentLink7Description: https://datasheet.octopart.com:443/CL10B105KA8NNNC-Samsung-Electro-Mechanics-datasheet-149136795.pdf?src-supplier=Future+Electronics; ComponentLink8URL: https://datasheet.octopart.com:443/CL10B105KA8NNNC-Samsung-datasheet-37081328.pdf?src-supplier=Future+Electronics; ComponentLink8Description: https://datasheet.octopart.com:443/CL10B105KA8NNNC-Samsung-datasheet-37081328.pdf?src-supplier=Future+Electronics; ComponentLink9URL: https://datasheet.octopart.com/CL10B105KA8NNNC-Samsung-Electro-Mechanics-datasheet-97040617.pdf; ComponentLink9Description: https://datasheet.octopart.com/CL10B105KA8NNNC-Samsung-Electro-Mechanics-datasheet-97040617.pdf; ComponentLink10URL: https://datasheet.octopart.com/CL10B105KA8NNNC-Samsung-Electro-Mechanics-datasheet-8324245.pdf; ComponentLink10Description: https://datasheet.octopart.com/CL10B105KA8NNNC-Samsung-Electro-Mechanics-datasheet-8324245.pdf; ComponentLink11URL: https://datasheet.octopart.com:443/CL10B105KA8NNNC-Samsung-datasheet-59220082.pdf?src-supplier=TME; ComponentLink11Description: https://datasheet.octopart.com:443/CL10B105KA8NNNC-Samsung-datasheet-59220082.pdf?src-supplier=TME; ComponentLink12URL: https://datasheet.octopart.com:443/CL10B105KA8NNNC-Samsung-Electro-Mechanics-datasheet-11897796.pdf?src-supplier=Arrow+Electronics; ComponentLink12Description: https://datasheet.octopart.com:443/CL10B105KA8NNNC-Samsung-Electro-Mechanics-datasheet-11897796.pdf?src-supplier=Arrow+Electronics; Supplier 1: DigiKey; Supplier Part Number 1: 1276-1184-1-ND; Supplier 2: DigiKey; Supplier Part Number 2: 1276-1184-2-ND; Supplier 3: Mouser; Supplier Part Number 3: 187-CL10B105KA8NNNC
footprint CAP0603-M (Chip Capacitor, 2-Leads, Body 1.60x0.80mm, IPC Medium Density)
pins: 1, 2

## C1uF 50V 0805
designator C?, comment value 1uF  (hidden comment: GCM21BR71H105KA03L)
0805 1 uF 50V ±10 % Tolerance X7R SMT Multilayer Ceramic Capacitor; Manufacturer: Murata; Manufacturer Lifecycle Status: IN PRODUCTION; Tolerance: 10%; Supplier: DigiKey; Supplier Part Number: 490-10675-1-ND; Manufacturer Part Number: GCM21BR71H105KA03L; RoHS: Compliant; Category: Ceramic Capacitors; Stock: 301002; Pricing: 1=0.22, 10=0.129, 50=0.0924, 100=0.0813, 500=0.06252, 1000=0.05674 (USD); Case/Package: 0805; Case Code (Imperial): 0805; Case Code (Metric): 2012; Depth: 1.2mm; Dielectric: X7R; Dielectric Material: Ceramic; Height: 1.25mm; Lead Free: Lead Free; Length: 2mm; Lifecycle Status: Production; Material: Ceramic; Max Operating Temperature: 125°C; Min Operating Temperature: -55°C; Mounting Technology: Surface Mount; Number of Terminals: 2; Radiation Hardening: No; Ratings: AEC-Q200; REACH SVHC: Yes; Schedule B: 8532240020, 8532240020|8532240020|8532240020|8532240020|8532240020|8532240020|8532240020|8532240020|8532240020|8532240020|8532240020|8532240020|8532240020|8532240020|8532240020|8532240020|8532240020|8532240020|8532240020|8532240020|8532240020|8532240020|8532240020|85; Termination: SMD/SMT; Voltage Rating: 50V; Voltage Rating (DC): 50V; Weight: 9.49709mg; Width: 1.25mm; ComponentLink1URL: https://datasheet.octopart.com:443/GCM21BR71H105KA03L-Murata-datasheet-68588095.pdf?src-supplier=Newark; ComponentLink1Description: https://datasheet.octopart.com:443/GCM21BR71H105KA03L-Murata-datasheet-68588095.pdf?src-supplier=Newark; ComponentLink2URL: https://datasheet.octopart.com:443/GCM21BR71H105KA03L-Murata-datasheet-141268690.pdf?src-supplier=Geoflip; ComponentLink2Description: https://datasheet.octopart.com:443/GCM21BR71H105KA03L-Murata-datasheet-141268690.pdf?src-supplier=Geoflip; ComponentLink3URL: https://datasheet.octopart.com:443/GCM21BR71H105KA03L-Murata-datasheet-165579661.pdf?src-supplier=TME; ComponentLink3Description: https://datasheet.octopart.com:443/GCM21BR71H105KA03L-Murata-datasheet-165579661.pdf?src-supplier=TME; ComponentLink4URL: https://datasheet.octopart.com:443/GCM21BR71H105KA03L-Murata-datasheet-62117434.pdf?src-supplier=TME; ComponentLink4Description: https://datasheet.octopart.com:443/GCM21BR71H105KA03L-Murata-datasheet-62117434.pdf?src-supplier=TME; ComponentLink5URL: https://datasheet.octopart.com:443/GCM21BR71H105KA03L-Murata-datasheet-140660287.pdf?src-supplier=Ciiva; ComponentLink5Description: https://datasheet.octopart.com:443/GCM21BR71H105KA03L-Murata-datasheet-140660287.pdf?src-supplier=Ciiva; ComponentLink6URL: https://datasheet.octopart.com:443/GCM21BR71H105KA03L-Murata-datasheet-138719653.pdf?src-supplier=Ciiva; ComponentLink6Description: https://datasheet.octopart.com:443/GCM21BR71H105KA03L-Murata-datasheet-138719653.pdf?src-supplier=Ciiva; ComponentLink7URL: https://datasheet.octopart.com:443/GCM21BR71H105KA03L-Murata-datasheet-31964969.pdf?src-supplier=Future+Electronics; ComponentLink7Description: https://datasheet.octopart.com:443/GCM21BR71H105KA03L-Murata-datasheet-31964969.pdf?src-supplier=Future+Electronics; ComponentLink8URL: https://datasheet.octopart.com/GCM21BR71H105KA03L-Murata-datasheet-14404532.pdf; ComponentLink8Description: https://datasheet.octopart.com/GCM21BR71H105KA03L-Murata-datasheet-14404532.pdf; ComponentLink9URL: http://sigma.octopart.com:80/reach_statement/Murata-company-16.pdf?src-supplier=Compliance+Statements; ComponentLink9Description: http://sigma.octopart.com:80/reach_statement/Murata-company-16.pdf?src-supplier=Compliance+Statements
footprint CAP0805-M (Chip Capacitor, 2-Leads, Body 2.00x1.25mm, IPC Medium Density)
pins: 1, 2

## C2.2nF 50V 0402
designator C?, comment value 2.2nF  (hidden comment: GRM155R71H222KA01D)
Multilayer Ceramic Capacitors MLCC Surface Mount 0402 2200pF 50 Volts X7R 10%; Manufacturer: Murata; Manufacturer Lifecycle Status: IN PRODUCTION; Voltage: 50V; Supplier: DigiKey; Supplier Part Number: 490-1305-1-ND; Manufacturer Part Number: GRM155R71H222KA01D; RoHS: Compliant; Category: Ceramic Capacitors; Stock: 659189; Pricing: 1=0.1, 10=0.017, 50=0.011, 100=0.0093, 500=0.00644, 1000=0.00556, 2500=0.00464, 5000=0.00444 (USD); Case/Package: 0402; Case Code (Imperial): 0402; Case Code (Metric): 1005; Depth: 500µm; Dielectric: X7R; Dielectric Material: Ceramic; Height: 500µm; Lead Free: Lead Free; Length: 1mm; Lifecycle Status: Production; Material: Ceramic; Max Operating Temperature: 125°C; Min Operating Temperature: -55°C; Mounting Technology: Surface Mount; Pins: 2; Number of Terminals: 2; Radiation Hardening: No; REACH SVHC: Yes; Schedule B: 8532240020, 8532240020|8532240020, 8532240020|8532240020|8532240020, 8532240020|8532240020|8532240020|8532240020; Termination: SMD/SMT; Thickness: 500µm; Tolerance: 10%; Voltage Rating: 50V; Voltage Rating (DC): 50V; Weight: 652.039032µg; Width: 500µm; ComponentLink1URL: https://datasheet.octopart.com:443/GRM155R71H222KA01D-Murata-datasheet-141913790.pdf?src-supplier=Upverter; ComponentLink1Description: https://datasheet.octopart.com:443/GRM155R71H222KA01D-Murata-datasheet-141913790.pdf?src-supplier=Upverter; ComponentLink2URL: https://datasheet.octopart.com:443/GRM155R71H222KA01D-Murata-datasheet-8817987.pdf?src-supplier=element14+APAC; ComponentLink2Description: https://datasheet.octopart.com:443/GRM155R71H222KA01D-Murata-datasheet-8817987.pdf?src-supplier=element14+APAC; ComponentLink3URL: https://datasheet.octopart.com:443/GRM155R71H222KA01D-Murata-datasheet-62317138.pdf?src-supplier=element14+APAC; ComponentLink3Description: https://datasheet.octopart.com:443/GRM155R71H222KA01D-Murata-datasheet-62317138.pdf?src-supplier=element14+APAC; ComponentLink4URL: https://datasheet.octopart.com:443/GRM155R71H222KA01D-Murata-datasheet-8331409.pdf?src-supplier=_legacy+Avnet; ComponentLink4Description: https://datasheet.octopart.com:443/GRM155R71H222KA01D-Murata-datasheet-8331409.pdf?src-supplier=_legacy+Avnet; ComponentLink5URL: https://datasheet.octopart.com:443/GRM155R71H222KA01D-Murata-datasheet-14396922.pdf?src-supplier=Future+Electronics; ComponentLink5Description: https://datasheet.octopart.com:443/GRM155R71H222KA01D-Murata-datasheet-14396922.pdf?src-supplier=Future+Electronics; ComponentLink6URL: https://datasheet.octopart.com:443/GRM155R71H222KA01D-Murata-datasheet-22122223.pdf?src-supplier=Future+Electronics; ComponentLink6Description: https://datasheet.octopart.com:443/GRM155R71H222KA01D-Murata-datasheet-22122223.pdf?src-supplier=Future+Electronics; ComponentLink7URL: https://datasheet.octopart.com:443/GRM155R71H222KA01D-Murata-datasheet-165579666.pdf?src-supplier=TME; ComponentLink7Description: https://datasheet.octopart.com:443/GRM155R71H222KA01D-Murata-datasheet-165579666.pdf?src-supplier=TME; ComponentLink8URL: https://datasheet.octopart.com:443/GRM155R71H222KA01D-Murata-datasheet-59876780.pdf?src-supplier=TME; ComponentLink8Description: https://datasheet.octopart.com:443/GRM155R71H222KA01D-Murata-datasheet-59876780.pdf?src-supplier=TME; ComponentLink9URL: https://datasheet.octopart.com:443/GRM155R71H222KA01D-Murata-datasheet-141266224.pdf?src-supplier=Ciiva; ComponentLink9Description: https://datasheet.octopart.com:443/GRM155R71H222KA01D-Murata-datasheet-141266224.pdf?src-supplier=Ciiva; ComponentLink10URL: https://datasheet.octopart.com:443/GRM155R71H222KA01D-Murata-datasheet-140692128.pdf?src-supplier=Ciiva; ComponentLink10Description: https://datasheet.octopart.com:443/GRM155R71H222KA01D-Murata-datasheet-140692128.pdf?src-supplier=Ciiva; ComponentLink11URL: https://datasheet.octopart.com:443/GRM155R71H222KA01D-Murata-datasheet-138741005.pdf?src-supplier=Ciiva; ComponentLink11Description: https://datasheet.octopart.com:443/GRM155R71H222KA01D-Murata-datasheet-138741005.pdf?src-supplier=Ciiva; ComponentLink12URL: https://datasheet.octopart.com/GRM155R71H222KA01D-Murata-datasheet-12515295.pdf; ComponentLink12Description: https://datasheet.octopart.com/GRM155R71H222KA01D-Murata-datasheet-12515295.pdf; ComponentLink13URL: https://datasheet.octopart.com/GRM155R71H222KA01D-Murata-datasheet-12510076.pdf; ComponentLink13Description: https://datasheet.octopart.com/GRM155R71H222KA01D-Murata-datasheet-12510076.pdf; ComponentLink14URL: https://datasheet.octopart.com/GRM155R71H222KA01D-Murata-datasheet-11978611.pdf; ComponentLink14Description: https://datasheet.octopart.com/GRM155R71H222KA01D-Murata-datasheet-11978611.pdf; ComponentLink15URL: https://datasheet.octopart.com/GRM155R71H222KA01D-Murata-datasheet-10025737.pdf; ComponentLink15Description: https://datasheet.octopart.com/GRM155R71H222KA01D-Murata-datasheet-10025737.pdf; ComponentLink16URL: https://datasheet.octopart.com/GRM155R71H222KA01D-Murata-datasheet-8819587.pdf; ComponentLink16Description: https://datasheet.octopart.com/GRM155R71H222KA01D-Murata-datasheet-8819587.pdf; ComponentLink17URL: https://datasheet.octopart.com:443/GRM155R71H222KA01D.-Murata-datasheet-5332913.pdf?src-supplier=Farnell; ComponentLink17Description: https://datasheet.octopart.com:443/GRM155R71H222KA01D.-Murata-datasheet-5332913.pdf?src-supplier=Farnell; ComponentLink18URL: https://datasheet.octopart.com:443/GRM155R71H222KA01D-Murata-datasheet-8217374.pdf?src-supplier=Jameco; ComponentLink18Description: https://datasheet.octopart.com:443/GRM155R71H222KA01D-Murata-datasheet-8217374.pdf?src-supplier=Jameco; ComponentLink19URL: https://datasheet.octopart.com:443/GRM155R71H222KA01D-Murata-datasheet-102.pdf?src-supplier=DigiKey; ComponentLink19Description: https://datasheet.octopart.com:443/GRM155R71H222KA01D-Murata-datasheet-102.pdf?src-supplier=DigiKey; ComponentLink20URL: https://datasheet.octopart.com:443/GRM155R71H222KA01D-Murata-datasheet-140568807.pdf?src-supplier=Arrow.cn; ComponentLink20Description: https://datasheet.octopart.com:443/GRM155R71H222KA01D-Murata-datasheet-140568807.pdf?src-supplier=Arrow.cn; ComponentLink21URL: http://sigma.octopart.com:80/reach_statement/Murata-company-16.pdf?src-supplier=Compliance+Statements; ComponentLink21Description: http://sigma.octopart.com:80/reach_statement/Murata-company-16.pdf?src-supplier=Compliance+Statements; Supplier 1: DigiKey; Supplier Part Number 1: 490-1305-1-ND; Supplier 2: DigiKey; Supplier Part Number 2: 490-1305-2-ND; Supplier 3: Mouser; Supplier Part Number 3: 81-GRM36X222K50
footprint C0402_H0P7
pins: 1, 2